# Altium schematic symbol library PCB_PTUMotorDriver.SCHLIB: 144 symbols (part 2 of 3)
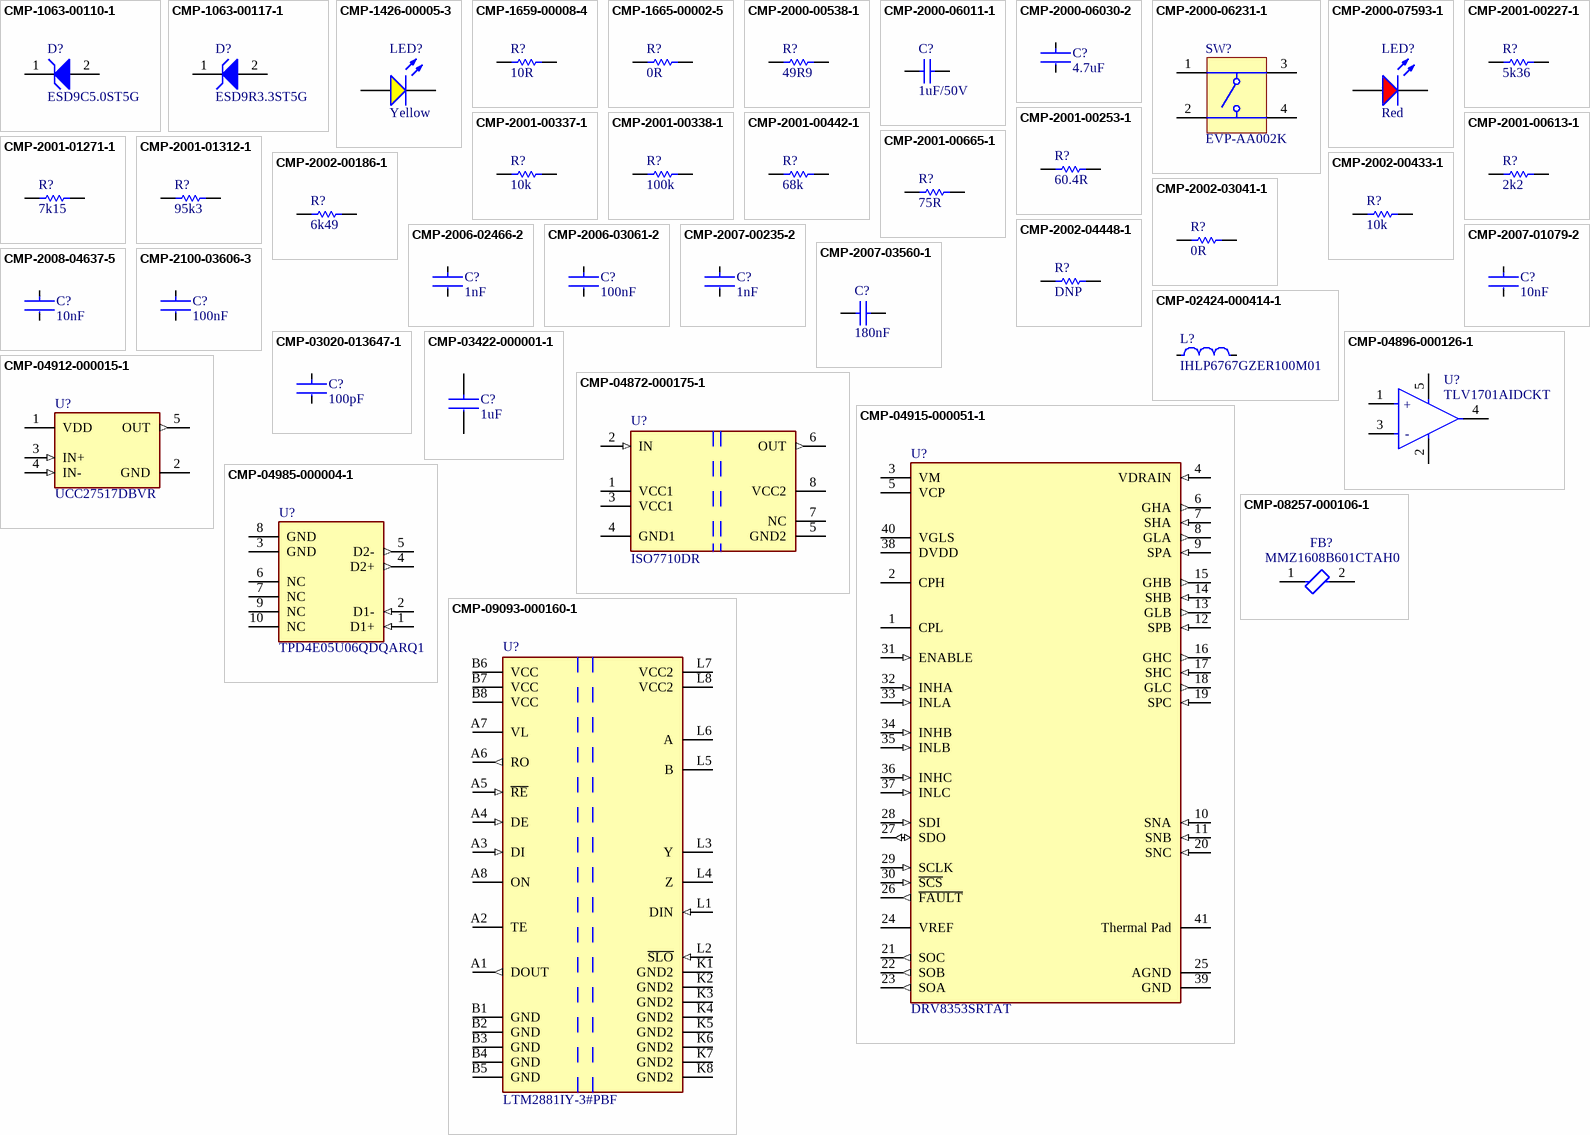
[diagram p4: symbols CMP-1063-00110-1 to CMP-09093-000160-1]

## CMP-2002-03041-1
designator R?, comment 0R
Resistor 0R 0402; Part Number: CRCW04020000Z0EDHP; Manufacturer: Vishay Dale; Value: 0Ohm; Voltage Rating: 50V; Power Rating: 200mW; Temperature Coefficient: 0ppm/°C; Max Power Dissipation: 125mW; Supplier 1: Digi-Key; Supplier Part Number 1: 541-0.0YBCT-ND; Manufacturer Part Number: CRCW04020000Z0EDHP; RoHS: Yes; Category: Chip SMD Resistors; Stock 1: 527407; Pricing 1: 1=0.13000, 10=0.11300, 25=0.07840, 50=0.06080, 100=0.04350, 250=0.03388, 500=0.02694, 1000=0.01912, 5000=0.01477 (USD); Mount: Surface Mount; Case/Package: 0402; Weight: 2.3E-05oz; Case Code (Metric): 1005; Case Code (Imperial): 0402; Contact Plating: Tin; Min Operating Temperature: -55°C; Max Operating Temperature: 155°C; Packaging: Tape and Reel; Composition: Thick Film; Termination: SMD/SMT; Voltage Rating (DC): 50V; Package Quantity: 1; Military Standard: Not; Number of Terminations: 2; Features: Automotive AEC-Q200; Length: 1mm; Height: 0.3mm; Width: 0.02inch; Depth: 0.5mm; Radiation Hardening: No; REACH SVHC: Unknown; Lead Free: Lead Free; ComponentLink1URL: https://datasheet.ciiva.com/16494/crcwhpe3-16494453.pdf?src-supplier=Future+Electronics; ComponentLink1Description: https://datasheet.ciiva.com/16494/crcwhpe3-16494453.pdf?src-supplier=Future+Electronics; ComponentLink2URL: https://datasheet.ciiva.com/2470/crcwhpe3-2470555.pdf?src-supplier=Digi-Key; ComponentLink2Description: https://datasheet.ciiva.com/2470/crcwhpe3-2470555.pdf?src-supplier=Digi-Key; ComponentLink3URL: https://datasheet.ciiva.com/5562/crcwhpe3-46056-5562315.pdf?src-supplier=Mouser; ComponentLink3Description: https://datasheet.ciiva.com/5562/crcwhpe3-46056-5562315.pdf?src-supplier=Mouser; ComponentLink4URL: https://datasheet.ciiva.com/9109/crcwhpe3-9109963.pdf?src-supplier=Avnet; ComponentLink4Description: https://datasheet.ciiva.com/9109/crcwhpe3-9109963.pdf?src-supplier=Avnet; ComponentLink5URL: https://datasheet.ciiva.com/2470/crcwhpe3-2470556.pdf?src-supplier=Digi-Key; ComponentLink5Description: https://datasheet.ciiva.com/2470/crcwhpe3-2470556.pdf?src-supplier=Digi-Key; ComponentLink6URL: https://datasheet.ciiva.com/28621/1912814-28621324.pdf?src-supplier=Element14; ComponentLink6Description: https://datasheet.ciiva.com/28621/1912814-28621324.pdf?src-supplier=Element14; ComponentLink7URL: https://datasheet.ciiva.com/2470/crcwhpe3-2470557.pdf?src-supplier=Digi-Key; ComponentLink7Description: https://datasheet.ciiva.com/2470/crcwhpe3-2470557.pdf?src-supplier=Digi-Key; ComponentLink8URL: https://datasheet.ciiva.com/7725/crcwhpe3-7725758.pdf?src-supplier=Element14; ComponentLink8Description: https://datasheet.ciiva.com/7725/crcwhpe3-7725758.pdf?src-supplier=Element14
footprint RESC1005X40X25ML05T10 (Chip Resistor, 2-Leads, Body 1.00x0.50mm, IPC Low Density)
footprint RESC1005X40X25LL05T10 (Chip Resistor, 2-Leads, Body 1.00x0.50mm, IPC High Density)
footprint RESC1005X40X25NL05T10 (Chip Resistor, 2-Leads, Body 1.00x0.50mm, IPC Medium Density)
pins: 1, 2
1 alternate drawing of the same symbol

## CMP-2002-04448-1
designator R?, comment DNP
Resistor 49R9 0402; Manufacturer Part Number: RK73H1ETTP49R9F; Manufacturer: KOA Speer; Supplier 1: Mouser; Supplier Part Number 1: 660-RK73H1ETTP49R9F
footprint RESC1005X40X25NL10T10 (Chip Resistor, 2-Leads, Body 1.00x0.50mm, IPC Medium Density)
footprint RESC1005X40X25ML10T10 (Chip Resistor, 2-Leads, Body 1.00x0.50mm, IPC Low Density)
footprint RESC1005X40X25LL10T10 (Chip Resistor, 2-Leads, Body 1.00x0.50mm, IPC High Density)
pins: 1, 2
1 alternate drawing of the same symbol

## CMP-2006-02466-2
designator C?, comment 1nF
Capacitor 1nF 0603; Voltage Rating: 100V; Tolerance: 5%; Dielectric: C0G; Temperature Coefficient: 30ppm/°C; Material: Ceramic; Depth: 0.8mm; Thickness: 0.035inch; Termination: SMD/SMT; Radiation Hardening: No; Case Code (Imperial): 0603; Length: 1.6mm; Min Operating Temperature: -55°C; REACH SVHC: No SVHC; Packaging: Tape and Reel; Capacitance: 1nF; Case Code (Metric): 1608; Voltage Rating (DC): 100V; Case/Package: 0603; Package Quantity: 1; Width: 0.031inch; Voltage: 100V; Height: 0.8mm; Max Operating Temperature: 125°C; Mount: Surface Mount; Lead Free: Lead Free; Manufacturer Part Number: ?
footprint FP-GRM188-0_1-e0_2_0_5-IPC_B
footprint FP-GRM188-0_1-e0_2_0_5-IPC_C
footprint FP-GRM188-0_1-e0_2_0_5-IPC_A
footprint FP-GRM188-0_1-e0_2_0_5-MFG
pins: 1, 2

## CMP-2006-03061-2
designator C?, comment 100nF
Capacitor 100nF 0603; Manufacturer: KEMET; Manufacturer Part Number: C0603C104K5RACTU; Tolerance: 0.1; Temperature Coefficient: 30ppm/°C; Material: Ceramic; Automotive Grade: Grade 1; Voltage Rating: 50 V; Value: 0.10 μF; Temperature Characteristic: X7R; Temperature: -55°C to +125°C; RoHS: TRUE; Temperature Range High: +125°C; Lead Free: Yes; Octopart: https://octopart.com/c0603c104k5ractu-kemet-139244; Digikey Description: CAP CER 0.1UF 50V X7R 0603; Category: Cap; Package: C0603C-CF; ComponentLink2Description: Datasheet; Temperature Range Low: -55°C; Device Class L1: Passive Components; Automotive: Yes; Device Class L3: Ceramic Capacitors; ComponentLink2URL: https://api.kemet.com/component-edge/download/datasheet/C0603C100J5GACAUTO.pdf; Capacitance: 0.10 μF; Device Class L2: Capacitors; Height: 0.87mm; Supplier 1: Mouser; Supplier Part Number 1: 80-C0603C104K5R7867
footprint FP-C0603C-CF-MFG
footprint FP-C0603C-CF-IPC_C
footprint FP-C0603C-CF-IPC_B
footprint FP-C0603C-CF-IPC_A
pins: 1, 2

## CMP-2007-00235-2
designator C?, comment 1nF
Capacitor 1nF 0805; Manufacturer: KEMET; Manufacturer Part Number: C0805C102J5GACTU; Value: 1,000 pF; Voltage Rating: 50 V; Temperature Characteristic: C0G; Material: Ceramic; Temperature Coefficient: 30ppm/°C; Tolerance: 0.05; Automotive: No; Device Class L1: Passive Components; Digikey Description: CAP CER 1000PF 50V C0G/NP0 0805; Lead Free: Yes; Capacitance: 1,000 pF; Package: C0805C-DN; RoHS: TRUE; Temperature Range High: +125°C; Height: 0.88mm; Ipc Land Pattern Name: CAPC200125X78; Category: Cap; ComponentLink2URL: https://content.kemet.com/datasheets/KEM_C1003_C0G_SMD.pdf; Device Class L2: Capacitors; ComponentLink2Description: Datasheet; Temperature: -55°C to +125°C; Octopart: https://octopart.com/c0805c102j5gactu-kemet-97757; Mouser Description: Multilayer Ceramic Capacitors MLCC - SMD/SMT 50volts 1000pF C0G 5%; Device Class L3: Ceramic Capacitors; Temperature Range Low: -55°C; Supplier 1: Mouser; Supplier Part Number 1: 80-C0805C102J5G
footprint FP-C0805C-DN-MFG
footprint FP-C0805C-DN-IPC_C
footprint FP-C0805C-DN-IPC_B
footprint FP-C0805C-DN-IPC_A
pins: 1, 2

## CMP-2007-01079-2
designator C?, comment 10nF
Capacitor 10nF 0805; Manufacturer Part Number: C0805C103K5RACTU; Manufacturer: KEMET; Capacitance: 10,000 pF; Material: Ceramic; Tolerance: 0.1; Voltage Rating: 50 V; Value: 10,000 pF; Temperature Coefficient: 30ppm/°C; Temperature Characteristic: X7R; Temperature: -55°C to +125°C; Device Class L3: Ceramic Capacitors; ComponentLink2URL: https://content.kemet.com/datasheets/KEM_C1003_C0G_SMD.pdf; Temperature Range Low: -55°C; Ipc Land Pattern Name: CAPC200125X78; Height: 0.88mm; Temperature Range High: +125°C; Category: Cap; ComponentLink2Description: Datasheet; Octopart: https://octopart.com/c0805c103k5ractu-kemet-90536; Package: C0805C-DN; Device Class L2: Capacitors; RoHS: TRUE; Automotive: No; Digikey Description: CAP CER 10000PF 50V X7R 0805; Device Class L1: Passive Components; Lead Free: Yes; Supplier 1: Farnell; Supplier Part Number 1: 1414662
footprint FP-C0805C-DN-MFG
footprint FP-C0805C-DN-IPC_C
footprint FP-C0805C-DN-IPC_B
footprint FP-C0805C-DN-IPC_A
pins: 1, 2

## CMP-2007-03560-1
designator C?, comment 180nF
Capacitor 180nF 0805; Manufacturer: Murata; Manufacturer Part Number: GRM21BR71C184KA01L; Supplier 1: Mouser; Supplier Part Number 1: 81-GRM40X184K16L
footprint CAPC2013X135X45ML10T25 (Chip Capacitor, 2-Leads, Body 2.00x1.25mm, IPC Low Density)
footprint CAPC2013X135X45LL10T25 (Chip Capacitor, 2-Leads, Body 2.00x1.25mm, IPC High Density)
footprint CAPC2013X135X45NL10T25 (Chip Capacitor, 2-Leads, Body 2.00x1.25mm, IPC Medium Density)
pins: 1, 2
1 alternate drawing of the same symbol

## CMP-2008-04637-5
designator C?, comment 10nF
Capacitor 10nF ?; Voltage Rating: 50V; Tolerance: 10%; Dielectric: X7R; Material: Ceramic; Voltage: 25V; Mount: Surface Mount; Max Operating Temperature: 125°C; Package Quantity: 1; Radiation Hardening: No; Length: 1mm; Voltage Rating (DC): 50V; Case Code (Metric): 1005; Packaging: Tape and Reel; Width: 0.02inch; Min Operating Temperature: -55°C; Height: 0.5mm; Case Code (Imperial): 0402; REACH SVHC: No SVHC; Lead Free: Lead Free; Case/Package: 0402; Termination: SMD/SMT; Thickness: 0.022inch; Number of Pins: 2; Capacitance: 10nF; Depth: 0.5mm
footprint FP-GRM155-0_05-IPC_C
footprint FP-GRM155-0_05-IPC_A
footprint FP-GRM155-0_05-IPC_B
footprint FP-GRM155-0_05-MFG
pins: 1, 2

## CMP-2100-03606-3
designator C?, comment 100nF
Capacitor 100nF 0805; Manufacturer Part Number: CC0805KRX7R9BB104; Manufacturer: Yageo; Tolerance: 0.1; Temperature Characteristic: X7R; Voltage Rating: 50 V; Material: Ceramic; Device Class L1: Passive Components; ComponentLink2Description: Datasheet; Package: CC0805-0.85; Digikey Description: CAP CER 0.1UF 50V X7R 0805; Capacitance: 100 nF; Device Class L3: Ceramic Capacitors; Value: 100 nF; Temperature: -30°C to +85°C; Height: 0.95mm; RoHS: TRUE; Ipc Land Pattern Name: CAPC200125X85; Device Class L2: Capacitors; Category: Cap; Temperature Range Low: -30°C; Temperature Range High: +85°C; Mouser Description: Multilayer Ceramic Capacitors MLCC - SMD/SMT 100nF 50V X7R 10%; Footprint Url: http://www.yageo.com/exep/pages/download/literatures/UPY-C_GEN_24.pdf; Automotive: No; Octopart: https://octopart.com/cc0805krx7r9bb104-yageo-192993; Lead Free: Yes; ComponentLink2URL: http://www.yageo.com/documents/recent/UPY-GPHC_Y5V_6.3V-to-50V_8.pdf; Supplier 1: Farnell; Supplier Part Number 1: 2346967
footprint FP-CC0805-0_85-MFG
footprint FP-CC0805-0_85-IPC_C
footprint FP-CC0805-0_85-IPC_B
footprint FP-CC0805-0_85-IPC_A
pins: 1, 2

## CMP-02424-000414-1
designator L?, comment IHLP6767GZER100M01
Commercial Inductors, High Saturation Series 10uH 16.5A 12mΩ 20%; Manufacturer Part Number: 70-IHLP6767GZER100M0; Saturation Current: 25A; Shielding: Shielded; Core Material: Metal; DC Resistance (DCR): 12mR; Test Frequency: 100kHz; Self Resonant Frequency: 2MHz; Min Operating Temperature: -55°C; RMS Current (Irms): 16.5A; Case/Package: 6767; Max DC Current: 25A; Depth: 17.15mm; Inductance: 10uH; Length: 17.15mm; Inductance Tolerance: 20%; Height - Seated (Max): 0.276inch; Military Standard: Not; Packaging: Tape and Reel; Package Quantity: 200; Lead Free: Lead Free; Height: 7mm; Max Operating Temperature: 125°C; Current Rating: 16.5A; Termination: SMD/SMT; Width: 0.675inch; Radiation Hardening: No; Mount: Surface Mount; Tolerance: 20%; Supplier 1: Mouser
footprint FP-IHLP-6767GZ-FP_3_825x1-MFG
pins: 1, 2

## CMP-03020-013647-1
designator C?, comment 100pF
Capacitor 100pF 0805 - unused; Manufacturer Part Number: C0805C101J5GACTU; Manufacturer: KEMET; Temperature Characteristic: C0G; Voltage Rating: 50 V; Tolerance: 0.05; Material: Ceramic; Temperature Coefficient: 30ppm/°C; Temperature Range High: +125°C; Device Class L1: Passive Components; Category: Cap; Capacitance: 100 pF; Temperature Range Low: -55°C; Height: 0.88mm; Package: C0805C-DN; Device Class L2: Capacitors; Octopart: https://octopart.com/c0805c101j5gactu-kemet-100795; Ipc Land Pattern Name: CAPC200125X78; Value: 100 pF; RoHS: TRUE; Temperature: -55°C to +125°C; Lead Free: Yes; Automotive: No; ComponentLink2URL: https://content.kemet.com/datasheets/KEM_C1003_C0G_SMD.pdf; ComponentLink2Description: Datasheet; Digikey Description: CAP CER 100PF 50V C0G/NP0 0805; Device Class L3: Ceramic Capacitors; Supplier 1: Digikey; Supplier Part Number 1: 399-C0805C101J5GACTUCT-ND
footprint FP-C0805C-DN-MFG
footprint FP-C0805C-DN-IPC_C
footprint FP-C0805C-DN-IPC_B
footprint FP-C0805C-DN-IPC_A
pins: 1, 2

## CMP-03422-000001-1
designator C?, comment 1uF
Capacitor 1uF 0805; Manufacturer: Yageo; Manufacturer Part Number: CC0805KKX7R7BB105; Voltage Rating: 16 V; Temperature Characteristic: X7R; Material: Ceramic; Tolerance: 0.1; Category: Cap; Capacitance: 1 uF; ComponentLink2Description: Datasheet; Automotive: No; Temperature Range High: +85°C; RoHS: TRUE; Footprint Url: http://www.yageo.com/exep/pages/download/literatures/UPY-C_GEN_24.pdf; Mouser Description: Multilayer Ceramic Capacitors MLCC - SMD/SMT 1.0uF 16V X7R 10%; Height: 0.95mm; Ipc Land Pattern Name: CAPC200125X85; Temperature: -30°C to +85°C; Lead Free: Yes; Value: 1 uF; Package: CC0805-0.85; Temperature Range Low: -30°C; Device Class L1: Passive Components; Device Class L3: Ceramic Capacitors; Octopart: https://octopart.com/cc0805kkx7r7bb105-yageo-8376555; ComponentLink2URL: http://www.yageo.com/documents/recent/UPY-GPHC_Y5V_6.3V-to-50V_8.pdf; Device Class L2: Capacitors; Digikey Description: CAP CER 1UF 16V X7R 0805; Supplier 1: Mouser; Supplier Part Number 1: 603-CC805KKX7R7BB105
footprint FP-CC0805-0_85-MFG
footprint FP-CC0805-0_85-IPC_C
footprint FP-CC0805-0_85-IPC_B
footprint FP-CC0805-0_85-IPC_A
pins: 1, 2

## CMP-04872-000175-1
designator U?, comment ISO7710DR
DGTL ISO 3000VRMS 1CH GP 8SOIC; Manufacturer: Texas Instruments; Number of Channels: 1; Data Rate: 100Mbps; Channel Type: Unidirectional; Propagation Delay: 16ns; Pulse Width Distortion (PWD): 4.9ns; Isolated Power: No; Interface: 1514Interface; Max Supply Voltage: 5.5V; Min Supply Voltage: 2.25V; Min Operating Temperature: -55°C; Type: General Purpose; Packaging: Tape and Reel; RoHS Compliant: Yes; Number of Pins: 8; Max Operating Temperature: 125°C; Case/Package: SOIC; Mount: Surface Mount; Supplier: Digikey; Supplier Part Number: 296-48557-1-ND; Manufacturer Part Number: ISO7710DR; RoHS: Yes; Category: Interface ICs; Stock: 1713; Pricing: 1=1.52, 10=1.111, 25=1.0088, 100=0.8959, 250=0.84212, 500=0.80966, 1000=0.78295 (USD); Length: 4.9mm; Width: 3.91mm; Height: 1.75mm; Thickness: 1.58mm; ComponentLink1URL: http://www.ti.com/general/docs/suppproductinfo.tsp?distId=10&amp;gotoUrl=http%3A%2F%2Fwww.ti.com%2Flit%2Fgpn%2Fiso7710&src-supplier=Digikey; ComponentLink1Description: http://www.ti.com/general/docs/suppproductinfo.tsp?distId=10&amp;gotoUrl=http%3A%2F%2Fwww.ti.com%2Flit%2Fgpn%2Fiso7710&src-supplier=Digikey
footprint FP-D0008B-IPC_A
footprint FP-D0008B-MFG
footprint FP-D0008B-IPC_C
footprint FP-D0008B-IPC_B
pins: 1 VCC1 (power), 2 IN (in), 3 VCC1 (power), 4 GND1 (power), 5 GND2 (power), 6 OUT (out), 7 NC, 8 VCC2 (power)

## CMP-04896-000126-1
designator U?, comment TLV1701AIDCKT
IC COMPARATOR SNGL 5SC70; Manufacturer Part Number: 595-TLV1701AIDCKT; Output Current: 20mA; Propagation Delay: 560ns; Max Input Current: 15nA; Quiescent Current: 75uA; Number of Channels: 1; Input Offset Voltage (Vos): 3.5mV; Min Operating Temperature: -40°C; Lead Free: Lead Free; Max Operating Temperature: 125°C; Mount: Surface Mount; Number of Pins: 5; RoHS Compliant: Yes; Type: General Purpose; Input Bias Current: 15nA; REACH SVHC: No SVHC; Response Time: 560ns; Case/Package: SC; Packaging: Tape and Reel; Number of Elements: 1; Supplier 1: Mouser
footprint FP-DCK0005A-IPC_A
footprint FP-DCK0005A-MFG
footprint FP-DCK0005A-IPC_C
footprint FP-DCK0005A-IPC_B
pins: 1 IN+ (hiz), 2 V- (power), 3 IN- (hiz), 4 OUT (oc), 5 V+ (power)
text: +; -

## CMP-04912-000015-1
designator U?, comment UCC27517DBVR
IC GATE DVR LOW SIDE 1CH SOT23-5; Manufacturer: Texas Instruments; Number Of Outputs: 1; Output Current: 4A; Standoff Height: 0mm; Fall Time: 7ns; Max Junction Temp: +140°C; Propagation Delay: 13ns; Min Supply Voltage: 4.5V; Max Supply Voltage: 18V; Rise Time: 8ns; ComponentLink2URL: https://www.ti.com/lit/ds/symlink/ucc27517.pdf; Mouser Description: 4A/4A Single Channel High-speed Low-side Gate Driver 5-SOT-23 -40 to 140; Digikey Description: IC GATE DVR LOW SIDE 1CH SOT23-5; Automotive: No; Category: IC; ComponentLink2Description: Datasheet; Package: DBV0005A; Octopart: https://octopart.com/ucc27517dbvr-texas+instruments-20613804; Number Of Drivers: 1; Device Class L2: Power Management ICs; Temperature Range High: +140°C; Temperature Range Low: -40°C; Device Class L3: Gate Drivers; Height: 1.45mm; Manufacturer Part Number: UCC27517DBVR; Device Class L1: Integrated Circuits (ICs); Lead Free: Yes; RoHS: TRUE; Temperature: -40°C to +140°C
footprint FP-DBV0005A-MFG
footprint FP-DBV0005A-IPC_C
footprint FP-DBV0005A-IPC_B
footprint FP-DBV0005A-IPC_A
pins: 1 VDD (power), 2 GND (power), 3 IN+ (in), 4 IN- (in), 5 OUT (out)

## CMP-04915-000051-1
designator U?, comment DRV8353SRTAT
IC MTR DRVR DC 6-95V 40WQFN; RoHS Compliant: Yes; Supplier 1: Mouser; Manufacturer Part Number: DRV8353SRTAT
footprint FP-RTA0040B-IPC_C
footprint FP-RTA0040B-IPC_A
footprint FP-RTA0040B-IPC_B
footprint FP-RTA0040B-MFG
pins: 1 CPL (power), 2 CPH (power), 3 VM (power), 4 VDRAIN (in), 5 VCP (power), 6 GHA (out), 7 SHA (in), 8 GLA (out), 9 SPA (in), 10 SNA (in), 11 SNB (in), 12 SPB (in), 13 GLB (out), 14 SHB (in), 15 GHB (out), 16 GHC (out), 17 SHC (in), 18 GLC (out), 19 SPC (in), 20 SNC (in), 21 SOC (out), 22 SOB (out), 23 SOA (out), 24 VREF, 25 AGND (power), 26 ~{FAULT} (out), 27 SDO (io), 28 SDI (in), 29 SCLK (in), 30 ~{SCS} (in), 31 ENABLE (in), 32 INHA (in), 33 INLA (in), 34 INHB (in), 35 INLB (in), 36 INHC (in), 37 INLC (in), 38 DVDD (power), 39 GND (power), 40 VGLS (power), 41 Thermal Pad (power)

## CMP-04985-000004-1
designator U?, comment TPD4E05U06QDQARQ1
TVS DIODE 5.5V 14V 10USON; Manufacturer: Texas Instruments; Direction: Unidirectional; Standoff Height: 0mm; Capacitance: 0.5pF; Number Of Channels: 4; Breakdown Voltage: 6.4V; Peak Pulse Power: 2.5W; Automotive Grade: Grade 1; Value: 0.5pF; Interface: USB,Ethernet,LVDS,Other; Peak Pulse Current: 2.5A; Operating Supply Voltage: 5.5V; Reverse Standoff Voltage: 5.5V; Package: DQA0010A; Temperature Range Low: -40°C; Temperature Range High: +125°C; Ambient Temperature Range Low: -40°C; Device Class L1: Circuit Protection; Clamping Voltage: 14V; Manufacturer Part Number: TPD4E05U06QDQARQ1; Device Class L2: ESD and Circuit Protection ICs; Octopart: https://octopart.com/tpd4e05u06qdqarq1-texas+instruments-48523459; Device Class L3: unset; Height: 0.55mm; Automotive: Yes; ComponentLink2Description: Datasheet; RoHS: TRUE; Ambient Temperature Range High: +125°C; Category: IC; Mouser Description: Automotive 4-Channel ESD Protection Solution for SuperSpeed (up to 5 Gbps) Interface 10-USON -40 to 125; Temperature: -40°C to +125°C; ComponentLink2URL: http://www.ti.com/lit/ds/symlink/tpd4e05u06-q1.pdf; Digikey Description: TVS DIODE 5.5V 14V 10USON; Lead Free: Yes
footprint FP-DQA0010A-MFG
pins: 1 D1+ (in), 2 D1- (in), 3 GND (power), 4 D2+ (out), 5 D2- (out), 6 NC, 7 NC, 8 GND (power), 9 NC, 10 NC

## CMP-08257-000106-1
designator FB?, comment MMZ1608B601CTAH0
Signal Line Ferrite Bead 600 Ω 100MHz 500mA DCR 400mΩ SMD 0603; Manufacturer: TDK; Tolerance: 25%; Impedance: 600R; DC Resistance (DCR): 400mR; Packaging: Cut Tape; Depth: 0.8mm; Case Code (Metric): 1608; Mount: Surface Mount; REACH SVHC: No SVHC; Case/Package: 0603; Max DC Current: 500mA; Height: 0.03inch; Case Code (Imperial): 0603; Package Quantity: 1; RoHS Compliant: Yes; Core Material: Ferrite; Length: 0.063inch; Current Rating: 500mA; Width: 0.031inch; Supplier: Digikey; Supplier Part Number: 445-MMZ1608B601CTAH0DKR-ND; Manufacturer Part Number: MMZ1608B601CTAH0; RoHS: Yes; Category: Ferrite Beads and Chips; Stock: 82523; Pricing: 1=0.1, 10=0.053, 25=0.046, 50=0.0414, 100=0.0372, 250=0.03208, 500=0.02858, 1000=0.02533 (USD); RMS Current (Irms): 500mA; ESR: 400mR; Test Frequency: 100MHz; ComponentLink1URL: https://datasheet.ciiva.com/46381/714910-46381640.pdf?src-supplier=Element14; ComponentLink1Description: https://datasheet.ciiva.com/46381/714910-46381640.pdf?src-supplier=Element14; ComponentLink2URL: https://datasheet.ciiva.com/46381/1795294-46381695.pdf?src-supplier=Element14; ComponentLink2Description: https://datasheet.ciiva.com/46381/1795294-46381695.pdf?src-supplier=Element14; ComponentLink3URL: https://datasheet.ciiva.com/46634/beads-commercial-signal-mmz-en-46634701.pdf?src-supplier=Digikey; ComponentLink3Description: https://datasheet.ciiva.com/46634/beads-commercial-signal-mmz-en-46634701.pdf?src-supplier=Digikey; ComponentLink4URL: https://datasheet.ciiva.com/46634/beads-commercial-signal-mmz-en-46634744.pdf?src-supplier=Digikey; ComponentLink4Description: https://datasheet.ciiva.com/46634/beads-commercial-signal-mmz-en-46634744.pdf?src-supplier=Digikey
footprint FP-MMZ1608-0_6-IPC_A
footprint FP-MMZ1608-0_6-MFG
footprint FP-MMZ1608-0_6-IPC_C
footprint FP-MMZ1608-0_6-IPC_B
pins: 1, 2

## CMP-09093-000160-1
designator U?, comment LTM2881IY-3#PBF
DGTL ISO 2.5KV RS422/RS485 32BGA; Manufacturer: Analog Devices / Linear Technology; Number of Transceivers: 1; Operating Supply Voltage: 3.3V; Supply Current: 25mA; Max Supply Voltage: 3.6V; Data Rate: 20Mbps; Interface: RS-422; Min Supply Voltage: 3V; Number of Channels: 1NUMBER; RoHS Compliant: Yes; Length: 15mm; Number of Transmitters: 1; Radiation Hardening: No; Case/Package: BGA; Series: µModule®; Mount: Surface Mount; Number of Receivers: 1; Width: 11.25mm; Height: 3.42mm; Number of Pins: 32; Package Quantity: 119; Number of Drivers: 1; Packaging: Tray; Max Operating Temperature: 85°C; REACH SVHC: No SVHC; Min Operating Temperature: -40°C; Nominal Supply Current: 25mA; Supplier: Digikey; Supplier Part Number: LTM2881IY-3#PBF-ND; Manufacturer Part Number: LTM2881IY-3#PBF; RoHS: Yes; Category: Interface ICs; Stock: 8537; Pricing: 1=22.88, 10=21.106, 25=20.1576, 119=18.02328, 238=17.19324, 476=16.36321 (USD); ComponentLink1URL: https://datasheet.ciiva.com/5688/1541719-zip-5688818.pdf?src-supplier=Farnell; ComponentLink1Description: https://datasheet.ciiva.com/5688/1541719-zip-5688818.pdf?src-supplier=Farnell; ComponentLink2URL: https://datasheet.ciiva.com/1700/28570-1700735.pdf?src-supplier=Digikey; ComponentLink2Description: https://datasheet.ciiva.com/1700/28570-1700735.pdf?src-supplier=Digikey; ComponentLink3URL: https://datasheet.ciiva.com/1559/1694679-1559769.pdf?src-supplier=Farnell; ComponentLink3Description: https://datasheet.ciiva.com/1559/1694679-1559769.pdf?src-supplier=Farnell; ComponentLink4URL: https://datasheet.ciiva.com/1503/1842976-1503057.pdf?src-supplier=Element14; ComponentLink4Description: https://datasheet.ciiva.com/1503/1842976-1503057.pdf?src-supplier=Element14
footprint FP-BGA-32-05-08-1851-MFG
footprint FP-BGA-32-05-08-1851-IPC_A
footprint FP-BGA-32-05-08-1851-IPC_B
footprint FP-BGA-32-05-08-1851-IPC_C
pins: A1 DOUT (out), A2 TE, A3 DI (in), A4 DE (in), A5 ~{RE} (in), A6 RO (out), A7 VL (power), A8 ON, B1 GND (power), B2 GND (power), B3 GND (power), B4 GND (power), B5 GND (power), B6 VCC (power), B7 VCC (power), B8 VCC (power), K1 GND2 (power), K2 GND2 (power), K3 GND2 (power), K4 GND2 (power), K5 GND2 (power), K6 GND2 (power), K7 GND2 (power), K8 GND2 (power), L1 DIN (in), L2 ~{SLO} (in), L3 Y (hiz), L4 Z (hiz), L5 B (hiz), L6 A (hiz), L7 VCC2 (power), L8 VCC2 (power)

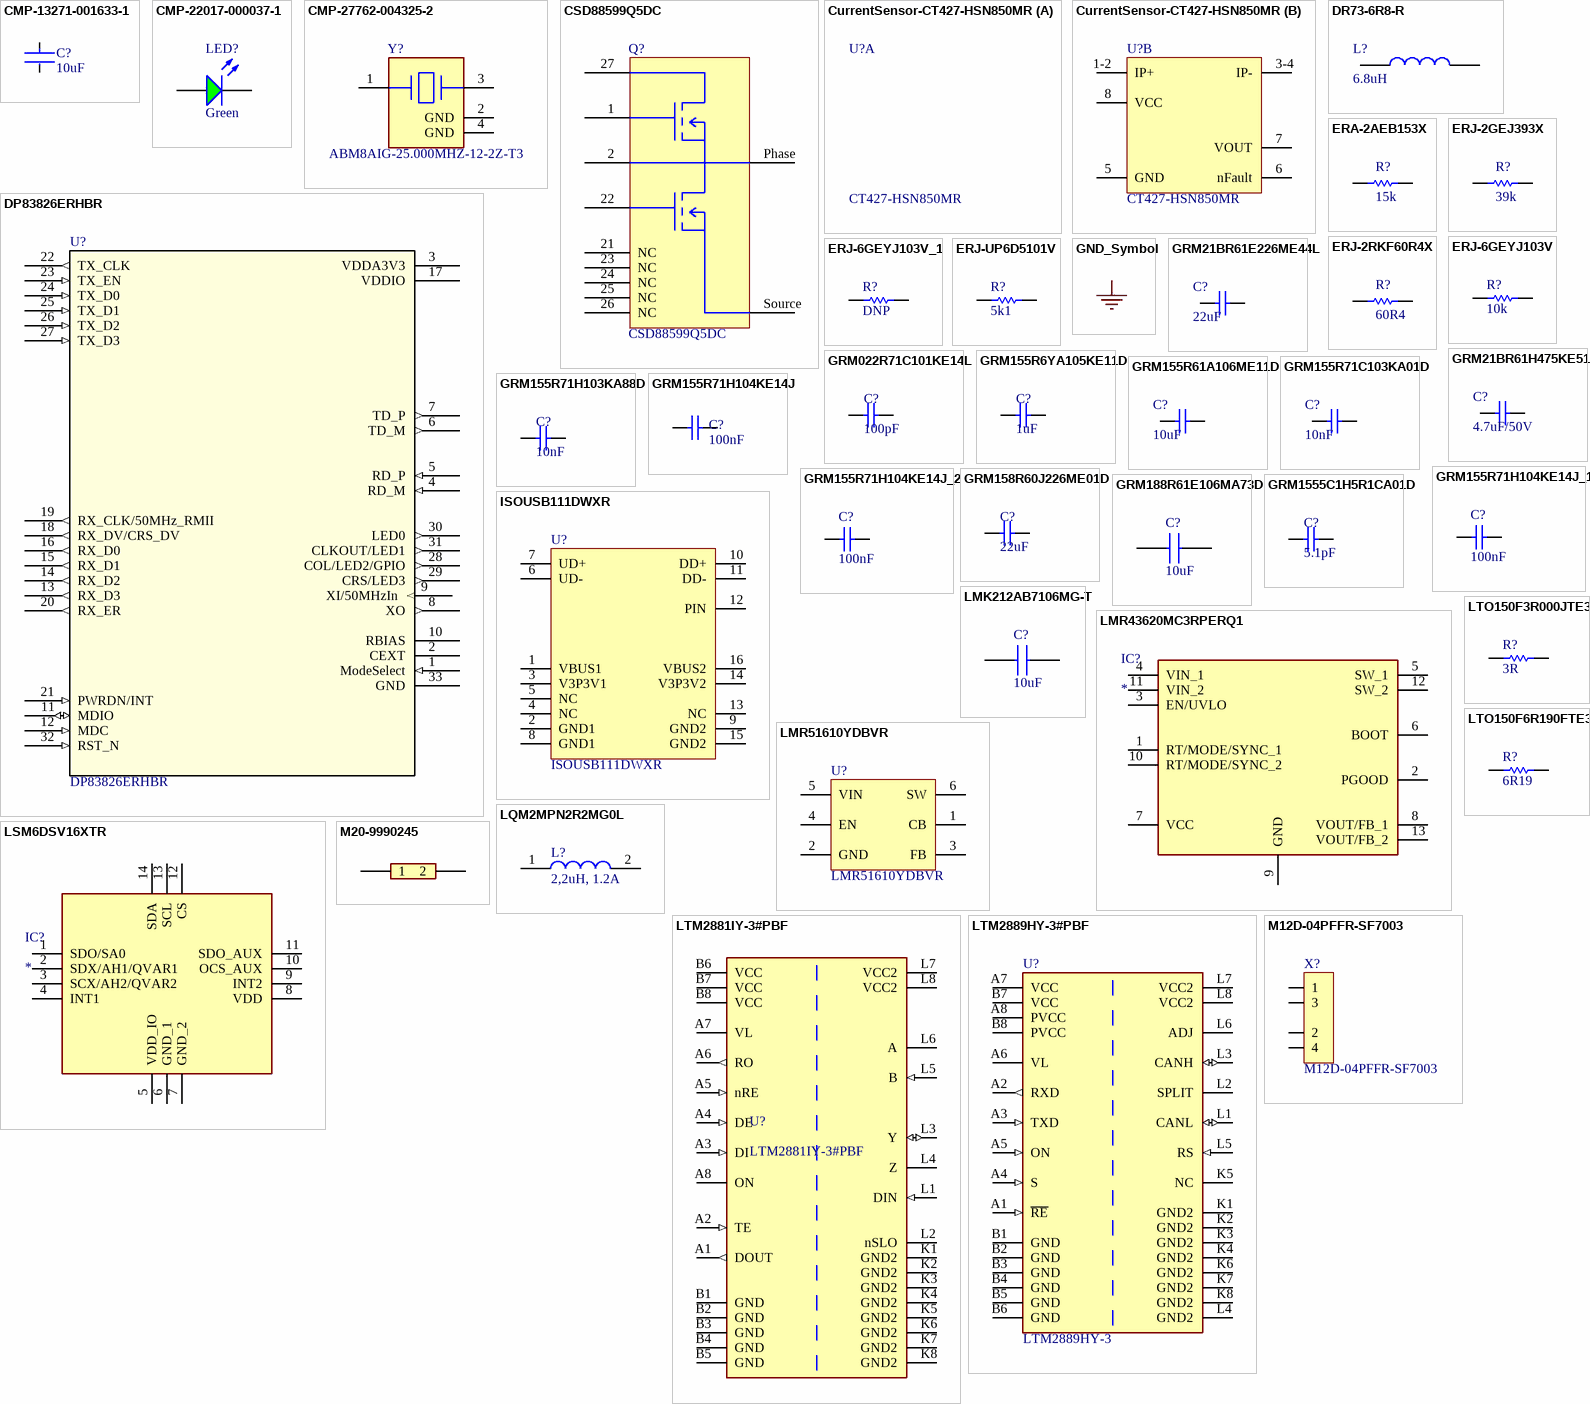
[diagram p2: symbols CMP-13271-001633-1 to M20-9990245]

## CMP-13271-001633-1
designator C?, comment 10uF
Cap Ceramic 10uF 16V X7R ±20% SMD 1206 +125°C Embossed T/R; Manufacturer Part Number: CL31B106MOHNNNE; Width: 0.063inch; Dielectric: X7R; Length: 0.126inch; Thickness: 0.071inch; Mount: Surface Mount; Packaging: Tape and Reel; Case Code (Imperial): 1206; Min Operating Temperature: -55°C; Tolerance: 20%; Case Code (Metric): 3216; Max Operating Temperature: 125°C; Voltage Rating: 16V; Capacitance: 10uF; Case/Package: 1206; Voltage Rating (DC): 16V
footprint FP-CL31-IPC_C
footprint FP-CL31-IPC_B
footprint FP-CL31-IPC_A
pins: 1, 2

## CMP-22017-000037-1
designator LED?, comment Green
LED GREEN CLEAR SMD; Manufacturer Part Number: 859-LTST-C171KGKT; Number of LEDs: 1; Viewing Angle: 130°; Lens Style: Rectangular; Dominant Wavelength: 571nm; Test Current: 20mA; Luminous Intensity: 35mcd; Power Rating: 75mW; Forward Voltage: 2.4V; Forward Current: 30mA; Reverse Voltage: 5V; Lens Color: Colorless; Wavelength: 574nm; Height: 0.8mm; Illumination Color: Green; Length: 2mm; Case/Package: 0805; Number of Pins: 2; Number of Elements: 1; Package Quantity: 1; Depth: 1.25mm; Lens Transparency: Clear; Width: 1.25mm; Color: Green; Radiation Hardening: No; Mount: Surface Mount; Packaging: Tape and Reel; Case Code (Metric): 2012; Lead Free: Lead Free; Max Operating Temperature: 85°C; Min Operating Temperature: -55°C; Case Code (Imperial): 0805; Power Dissipation: 75mW; Supplier 1: Mouser
footprint FP-LTST-C171KGKT-MFG
pins: 1 K, 2 A

## CMP-27762-004325-2
designator Y?, comment ABM8AIG-25.000MHZ-12-2Z-T3
Crystal 25MHz ±20ppm (Tol) ±50ppm (Stability) 12pF FUND 50Ω Automotive 4-Pin Ultra Mini-CSMD T/R; ESR (Equivalent Series Resistance): 50R; Load Capacitance: 12pF; Ratings: AEC-Q200; Frequency: 25MHz; Packaging: Cut Tape; Frequency Stability: 50ppm; Series: ABM8AIG; RoHS Compliant: Yes; Height: 0.031inch; Width: 0.098inch; Mount: Surface Mount; Length: 0.126inch; Frequency Tolerance: 20ppm; Min Operating Temperature: -40°C; Case/Package: SMD/SMT; Max Operating Temperature: 125°C; Manufacturer Part Number: ABM8AIG-25.000MHZ-12-2Z-T3
footprint FP-ABM8AIG-MFG
pins: 1, 2 GND (power), 3, 4 GND (power)

## CSD88599Q5DC
designator Q?
Integrated Circuit; Manufacturer_Name: Texas Instruments; Datasheet Link: http://www.ti.com/lit/ds/symlink/csd88599q5dc.pdf; Height: 1.05mm; Manufacturer Part Number: CSD88599Q5DC; Mouser Part Number: 595-CSD88599Q5DC; Mouser Price/Stock: https://www.mouser.co.uk/ProductDetail/Texas-Instruments/CSD88599Q5DC?qs=5aG0NVq1C4z5gVbcQ76feA%3D%3D; Arrow Part Number: CSD88599Q5DC; Arrow Price/Stock: null?region=nac; Supplier 1: Mouser; Supplier Part Number 1: 595-CSD88599Q5DC
footprint CSD88599Q5DC
pins: 1, 2, 21 NC, 22, 23 NC, 24 NC, 25 NC, 26 NC, 27, Phase, Source

## CurrentSensor-CT427-HSN850MR
designator U?, comment CT427-HSN850MR
Manufacturer Part Number: 462-CT427-HSN850MR; Supplier 1: Mouser
footprint SOIC8-CT427
part B pins: 1-2 IP+, 3-4 IP-, 5 GND, 6 nFault, 7 VOUT, 8 VCC

## DP83826ERHBR
designator U?
Ethernet Transceiver, 1-Trnsvr, PQCC32; Manufacturer: Texas Instruments; Supplier: Digikey; Supplier Part Number: 296-DP83826ERHBRCT-ND; Manufacturer Part Number: DP83826ERHBR; RoHS: Yes; Category: Ethernet Interface ICs; Stock: 2127; Pricing: 1=3.1, 10=2.321, 25=2.1264, 100=1.9128, 250=1.81096, 500=1.74958, 1000=1.69905 (USD); ComponentLink1URL: https://www.ti.com:443/lit/ds/symlink/dp83826e.pdf?src-supplier=IHS+Markit; ComponentLink1Description: https://www.ti.com:443/lit/ds/symlink/dp83826e.pdf?src-supplier=IHS+Markit; ComponentLink2URL: http://www.ti.com/general/docs/suppproductinfo.tsp?distId=10&amp;gotoUrl=http%3A%2F%2Fwww.ti.com%2Flit%2Fgpn%2Fdp83826e&src-supplier=Digikey; ComponentLink2Description: http://www.ti.com/general/docs/suppproductinfo.tsp?distId=10&amp;gotoUrl=http%3A%2F%2Fwww.ti.com%2Flit%2Fgpn%2Fdp83826e&src-supplier=Digikey; Supplier 1: Mouser; Supplier Part Number 1: 595-DP83826ERHBR; Supplier 2: Digikey; Supplier Part Number 2: 296-DP83826ERHBRCT-ND
footprint QFN_ERHBR_TEX
pins: 1 ModeSelect (in), 2 CEXT, 3 VDDA3V3 (power), 4 RD_M (in), 5 RD_P (in), 6 TD_M (out), 7 TD_P (out), 8 XO (out), 9 XI/50MHzIn (in), 10 RBIAS, 11 MDIO (io), 12 MDC (in), 13 RX_D3 (out), 14 RX_D2 (out), 15 RX_D1 (out), 16 RX_D0 (out), 17 VDDIO (power), 18 RX_DV/CRS_DV (out), 19 RX_CLK/50MHz_RMII (out), 20 RX_ER (out), 21 PWRDN/INT (in), 22 TX_CLK (out), 23 TX_EN (in), 24 TX_D0 (in), 25 TX_D1 (in), 26 TX_D2 (in), 27 TX_D3 (in), 28 COL/LED2/GPIO (out), 29 CRS/LED3 (out), 30 LED0 (out), 31 CLKOUT/LED1 (out), 32 RST_N (in), 33 GND (power)

## DR73-6R8-R
designator L?, comment 6.8uH
Inductor 6.8uH 2.55A 43.5 MOHM; Manufacturer_Name: Eaton; Manufacturer Part Number: DR73-6R8-R; Datasheet Link: https://www.eaton.com/content/dam/eaton/products/electronic-components/resources/data-sheet/eaton-dr-high-power-density-high-efficiency-shielded-drum-core-power-inductors-data-sheet.pdf; Height: 3.55mm; Mouser Part Number: 704-DR73-6R8-R; Mouser Price/Stock: https://www.mouser.co.uk/ProductDetail/Eaton-Electronics/DR73-6R8-R?qs=yzwxPInThYRgvP%252Bo5UKn2A%3D%3D; Arrow Part Number: DR73-6R8-R; Arrow Price/Stock: https://www.arrow.com/en/products/dr73-6r8-r/eaton?utm_currency=USD&region=nac
footprint DR736R8R
pins: 1, 2

## ERA-2AEB153X
designator R?, comment 15k
Resistor 15k 0402; Manufacturer_Name: Panasonic; Manufacturer Part Number: ERA-2AEB153X; Datasheet Link: http://industrial.panasonic.com/cdbs/www-data/pdf/RDM0000/AOA0000C307.pdf; Height: 0.4mm; Mouser Part Number: 667-ERA-2AEB153X; Mouser Price/Stock: https://www.mouser.co.uk/ProductDetail/Panasonic/ERA-2AEB153X?qs=YFwoyZoVY0idffT2yupmlA%3D%3D; Arrow Part Number: ERA-2AEB153X; Arrow Price/Stock: https://www.arrow.com/en/products/era2aeb153x/panasonic?utm_currency=USD&region=nac
footprint ERA2AED122X
pins: 1, 2

## ERJ-2GEJ393X
designator R?, comment 39k
Resistor 39k 0402; Manufacturer_Name: Panasonic; Manufacturer Part Number: ERJ-2GEJ393X; Datasheet Link: https://datasheet.datasheetarchive.com/originals/distributors/DKDS40/DSANUWW0010662.pdf; Height: 0.4mm; Mouser Part Number: 667-ERJ-2GEJ393X; Mouser Price/Stock: https://www.mouser.co.uk/ProductDetail/Panasonic/ERJ-2GEJ393X?qs=H7k1u0Mp9JQCuMRf%252BnUDFQ%3D%3D
footprint ERJ2RKD1004X
pins: 1, 2

## ERJ-2RKF60R4X
designator R?, comment 60R4
Resistor 60R4 1% 0402; Manufacturer_Name: Panasonic; Manufacturer Part Number: ERJ-2RKF60R4X; Datasheet Link: https://industrial.panasonic.com/cdbs/www-data/pdf/RDA0000/AOA0000C86.pdf; Height: 0.4mm; Mouser Part Number: 667-ERJ-2RKF60R4X; Mouser Price/Stock: https://www.mouser.com/Search/Refine.aspx?Keyword=667-ERJ-2RKF60R4X; Arrow Part Number: ERJ-2RKF60R4X; Arrow Price/Stock: https://www.arrow.com/en/products/erj-2rkf60r4x/panasonic?utm_currency=USD&region=europe; Supplier 1: DigiKey; Supplier Part Number 1: P60.4LCT-ND; Supplier 2: Mouser; Supplier Part Number 2: 667-ERJ-2RKF60R4X; Tollerance: 1%
footprint ERJ2RKD1004X
pins: 1, 2

## ERJ-6GEYJ103V
designator R?, comment 10k
Resistor 10k 0805; Manufacturer_Name: Panasonic; Manufacturer Part Number: ERJ-6GEYJ103V; Datasheet Link: https://datasheet.datasheetarchive.com/originals/distributors/DKDS40/DSANUWW0010911.pdf; Height: 0.7mm; Mouser Part Number: 667-ERJ-6GEYJ103V; Mouser Price/Stock: https://www.mouser.co.uk/ProductDetail/Panasonic/ERJ-6GEYJ103V?qs=tQNqqtTOejK5rw%252BRxJVxUA%3D%3D; Arrow Part Number: ERJ-6GEYJ103V; Arrow Price/Stock: https://www.arrow.com/en/products/erj6geyj103v/panasonic?region=nac; Supplier 1: Mouser; Supplier Part Number 1: 71-CRCW0603-10K-E3; Supplier 2: Digikey; Supplier Part Number 2: P10KADKR-ND
footprint RESC2012X70N
pins: 1, 2

## ERJ-6GEYJ103V_1
designator R?, comment DNP
Resistor 10k 0805; Manufacturer_Name: Panasonic; Manufacturer Part Number: ERJ-6GEYJ103V; Datasheet Link: https://datasheet.datasheetarchive.com/originals/distributors/DKDS40/DSANUWW0010911.pdf; Height: 0.7mm; Mouser Part Number: 667-ERJ-6GEYJ103V; Mouser Price/Stock: https://www.mouser.co.uk/ProductDetail/Panasonic/ERJ-6GEYJ103V?qs=tQNqqtTOejK5rw%252BRxJVxUA%3D%3D; Arrow Part Number: ERJ-6GEYJ103V; Arrow Price/Stock: https://www.arrow.com/en/products/erj6geyj103v/panasonic?region=nac; Supplier 1: Mouser; Supplier Part Number 1: 667-ERJ-6GEYJ103V
footprint RESC2012X70N
pins: 1, 2

## ERJ-UP6D5101V
designator R?, comment 5k1
Resistor 5k1 0805; Manufacturer_Name: Panasonic; Manufacturer Part Number: ERJ-UP6D5101V; Datasheet Link: https://industrial.panasonic.com/cdbs/www-data/pdf/RDP0000/AOA0000C337.pdf; Height: 0.7mm; Mouser Part Number: 667-ERJ-UP6D5101V; Mouser Price/Stock: https://www.mouser.co.uk/ProductDetail/Panasonic/ERJ-UP6D5101V?qs=ZcfC38r4Pouz7%2FLHthUDHQ%3D%3D; Arrow Part Number: ERJ-UP6D5101V; Arrow Price/Stock: https://www.arrow.com/en/products/erj-up6d5101v/panasonic?utm_currency=USD&region=nac; Supplier 1: Mouser; Supplier Part Number 1: 667-ERJ-UP6D5101V
footprint ERJUP6
pins: 1, 2

## GND_Symbol
designator *  (value not drawn)  (graphical)

## GRM21BR61E226ME44L
designator C?, comment 22uF
Capacitor 22uF 0805; Manufacturer_Name: Murata Electronics; Manufacturer Part Number: GRM21BR61E226ME44L; Datasheet Link: https://search.murata.co.jp/Ceramy/image/img/A01X/G101/ENG/GRM21BR61E226ME44-01A.pdf; Height: 1.45mm; Mouser Part Number: 81-GRM21BR61E226ME4L; Mouser Price/Stock: https://www.mouser.co.uk/ProductDetail/Murata-Electronics/GRM21BR61E226ME44L?qs=07yfQVYDK7vCPbMhLHi95g%3D%3D; Arrow Part Number: GRM21BR61E226ME44L; Arrow Price/Stock: https://www.arrow.com/en/products/grm21br61e226me44l/murata-manufacturing?utm_currency=USD&region=nac
footprint CAPC2012X145N
pins: 1, 2

## GRM21BR61H475KE51L
designator C?, comment 4.7uF/50V
Capacitor 4.7uF/50V 0805; Manufacturer_Name: Murata Electronics; Manufacturer Part Number: GRM21BR61H475KE51L; Datasheet Link: https://search.murata.co.jp/Ceramy/image/img/A01X/G101/ENG/GRM21BR61H475KE51-01A.pdf; Height: 1.45mm; Mouser Part Number: 81-GRM21BR61H475KE1L; Mouser Price/Stock: https://www.mouser.co.uk/ProductDetail/Murata-Electronics/GRM21BR61H475KE51L?qs=eeBpzGFlv%252B%252BOtLzDC1PY6Q%3D%3D; Arrow Part Number: GRM21BR61H475KE51L; Arrow Price/Stock: https://www.arrow.com/en/products/grm21br61h475ke51l/murata-manufacturing?region=nac
footprint CAPC2012X145N
pins: 1, 2

## GRM022R71C101KE14L
designator C?, comment 100pF
Capacitor 100pF/16V 0402; Manufacturer_Name: Murata Electronics; Manufacturer Part Number: GRM022R71C101KE14L; Datasheet Link: https://search.murata.co.jp/Ceramy/image/img/A01X/G101/ENG/GRM022R71C101KE14-01A.pdf; Height: 0.22mm; Mouser Part Number: 81-GRM022R71C101KE4L; Mouser Price/Stock: https://www.mouser.com/Search/Refine.aspx?Keyword=81-GRM022R71C101KE4L
footprint CAPC0402X22N
pins: 1, 2

## GRM155R6YA105KE11D
designator C?, comment 1uF
Capacitor 1uF/35V 0402 - storage; Manufacturer_Name: Murata Electronics; Manufacturer Part Number: GRM155R6YA105KE11D; Datasheet Link: https://search.murata.co.jp/Ceramy/image/img/A01X/G101/ENG/GRM155R6YA105KE11-01A.pdf; Height: 0.7mm; Mouser Part Number: 81-GRM155R6YA105KE1D; Mouser Price/Stock: https://www.mouser.co.uk/ProductDetail/Murata-Electronics/GRM155R6YA105KE11D?qs=hNud%2FORuBR1Z%2F4J6kBsCGQ%3D%3D; Arrow Part Number: GRM155R6YA105KE11D; Arrow Price/Stock: https://www.arrow.com/en/products/grm155r6ya105ke11d/murata-manufacturing?region=europe
footprint CAPC1005X70N
pins: 1, 2

## GRM155R61A106ME11D
designator C?, comment 10uF
Capacitor 10uF 0402 - storage; Manufacturer_Name: Murata Electronics; Manufacturer Part Number: GRM155R61A106ME11D; Datasheet Link: https://search.murata.co.jp/Ceramy/image/img/A01X/G101/ENG/GRM155R61A106ME11-01A.pdf; Height: 0.33mm; Mouser Part Number: 81-GRM155R61A106ME1D; Mouser Price/Stock: https://www.mouser.co.uk/ProductDetail/Murata-Electronics/GRM155R61A106ME11D?qs=xZ%2FP%252Ba9zWqZMJSi57Q8OyA%3D%3D; Arrow Part Number: GRM155R61A106ME11D; Arrow Price/Stock: https://www.arrow.com/en/products/grm155r61a106me11d/murata-manufacturing?utm_currency=USD&region=nac
footprint GRM15x
pins: 1, 2

## GRM155R71C103KA01D
designator C?, comment 10nF
Capacitor 10nF 0402; Manufacturer_Name: Murata Electronics; Manufacturer Part Number: GRM155R71C103KA01D; Datasheet Link: https://search.murata.co.jp/Ceramy/image/img/A01X/G101/ENG/GRM155R71C103KA01-01A.pdf; Height: 0.7mm; Mouser Part Number: 81-GRM36X103K16; Mouser Price/Stock: https://www.mouser.co.uk/ProductDetail/Murata-Electronics/GRM155R71C103KA01D?qs=8YPuuxuUzMI%252B9QLnzeLwhQ%3D%3D; Arrow Part Number: GRM155R71C103KA01D; Arrow Price/Stock: https://www.arrow.com/en/products/grm155r71c103ka01d/murata-manufacturing?utm_currency=USD&region=nac
footprint CAPC1005X70N
pins: 1, 2

## GRM155R71H103KA88D
designator C?, comment 10nF
Capacitor 10nF/50V 0402 - storage; Manufacturer_Name: Murata Electronics; Manufacturer Part Number: GRM155R71H103KA88D; Datasheet Link: https://search.murata.co.jp/Ceramy/image/img/A01X/G101/ENG/GRM155R71H103KA88-01A.pdf; Height: 0.33mm; Mouser Part Number: 81-GRM155R71H103KA8D; Mouser Price/Stock: https://www.mouser.co.uk/ProductDetail/Murata-Electronics/GRM155R71H103KA88D?qs=Dfh4SrgScWxOVlCuzd3ZyQ%3D%3D; Arrow Part Number: GRM155R71H103KA88D; Arrow Price/Stock: https://www.arrow.com/en/products/grm155r71h103ka88d/murata-manufacturing?utm_currency=USD&region=nac
footprint GRM15x
pins: 1, 2

## GRM155R71H104KE14J
designator C?, comment 100nF
Capacitor 100nF 0402 - storage; Manufacturer: Murata; Manufacturer Part Number: GRM155R71H104KE14J; Tolerance: 10%; Dielectric: X7R; Voltage Rating (DC): 50V; Supplier 1: Digi-Key; RoHS: Yes; Category: Ceramic Capacitors; Stock 1: 1916144; Pricing 1: 1=0.10000, 10=0.03800, 100=0.01680, 500=0.01198, 1000=0.00941, 2500=0.00855, 5000=0.00787 (USD); Mount: Surface Mount; Case/Package: 0402; Weight: 0.000212oz; Case Code (Imperial): 0402; Case Code (Metric): 1005; Min Operating Temperature: -55°C; Max Operating Temperature: 125°C; Termination: SMD/SMT; Composition: Ceramic; Package Quantity: 50000; Packaging: Tape and Reel; Value: 100nF; Voltage Rating: 50V; Length: 0.039inch; Height: 0.5mm; Width: 0.5mm; Thickness: 0.022inch; Lead Free: Lead Free; ComponentLink1URL: http://search.murata.co.jp/Ceramy/image/img/A01X/G101/ENG/GRM155R71H104KE14-01.pdf?src-supplier=Mouser; ComponentLink1Description: http://search.murata.co.jp/Ceramy/image/img/A01X/G101/ENG/GRM155R71H104KE14-01.pdf?src-supplier=Mouser; ComponentLink2URL: http://search.murata.co.jp/Ceramy/image/img/A01X/G101/ENG/GRM155R71H104KE14-01.pdf?src-supplier=Digi-Key; ComponentLink2Description: http://search.murata.co.jp/Ceramy/image/img/A01X/G101/ENG/GRM155R71H104KE14-01.pdf?src-supplier=Digi-Key; ComponentLink3URL: http://search.murata.co.jp/Ceramy/image/img/A01X/G101/ENG/GRM155R71H104KE14-01.pdf?src-supplier=Avnet; ComponentLink3Description: http://search.murata.co.jp/Ceramy/image/img/A01X/G101/ENG/GRM155R71H104KE14-01.pdf?src-supplier=Avnet; ComponentLink4URL: http://search.murata.co.jp/Ceramy/image/img/A01X/G101/ENG/GRM155R71H104KE14-01.pdf?src-supplier=Avnet+Europe; ComponentLink4Description: http://search.murata.co.jp/Ceramy/image/img/A01X/G101/ENG/GRM155R71H104KE14-01.pdf?src-supplier=Avnet+Europe; Supplier Part Number 1: 490-13342-1-ND
footprint CAPC1005X55X25LL05T10 (Chip Capacitor, 2-Leads, Body 1.00x0.50mm, IPC High Density)
footprint CAPC1005X55X25ML05T10 (Chip Capacitor, 2-Leads, Body 1.00x0.50mm, IPC Low Density)
footprint CAPC1005X55X25NL05T10 (Chip Capacitor, 2-Leads, Body 1.00x0.50mm, IPC Medium Density)
pins: 1, 2

## GRM155R71H104KE14J_1
designator C?, comment 100nF
Capacitor 0.1uF 0402; Manufacturer: Murata; Manufacturer Part Number: GRM155R71H104KE14J; Tolerance: 10%; Dielectric: X7R; Voltage Rating (DC): 50V; Supplier 1: Digi-Key; RoHS: Yes; Category: Ceramic Capacitors; Stock 1: 1916144; Pricing 1: 1=0.10000, 10=0.03800, 100=0.01680, 500=0.01198, 1000=0.00941, 2500=0.00855, 5000=0.00787 (USD); Mount: Surface Mount; Case/Package: 0402; Weight: 0.000212oz; Case Code (Imperial): 0402; Case Code (Metric): 1005; Min Operating Temperature: -55°C; Max Operating Temperature: 125°C; Termination: SMD/SMT; Composition: Ceramic; Package Quantity: 50000; Packaging: Tape and Reel; Value: 100nF; Voltage Rating: 50V; Length: 0.039inch; Height: 0.5mm; Width: 0.5mm; Thickness: 0.022inch; Lead Free: Lead Free; ComponentLink1URL: http://search.murata.co.jp/Ceramy/image/img/A01X/G101/ENG/GRM155R71H104KE14-01.pdf?src-supplier=Mouser; ComponentLink1Description: http://search.murata.co.jp/Ceramy/image/img/A01X/G101/ENG/GRM155R71H104KE14-01.pdf?src-supplier=Mouser; ComponentLink2URL: http://search.murata.co.jp/Ceramy/image/img/A01X/G101/ENG/GRM155R71H104KE14-01.pdf?src-supplier=Digi-Key; ComponentLink2Description: http://search.murata.co.jp/Ceramy/image/img/A01X/G101/ENG/GRM155R71H104KE14-01.pdf?src-supplier=Digi-Key; ComponentLink3URL: http://search.murata.co.jp/Ceramy/image/img/A01X/G101/ENG/GRM155R71H104KE14-01.pdf?src-supplier=Avnet; ComponentLink3Description: http://search.murata.co.jp/Ceramy/image/img/A01X/G101/ENG/GRM155R71H104KE14-01.pdf?src-supplier=Avnet; ComponentLink4URL: http://search.murata.co.jp/Ceramy/image/img/A01X/G101/ENG/GRM155R71H104KE14-01.pdf?src-supplier=Avnet+Europe; ComponentLink4Description: http://search.murata.co.jp/Ceramy/image/img/A01X/G101/ENG/GRM155R71H104KE14-01.pdf?src-supplier=Avnet+Europe; Supplier Part Number 1: 490-13342-1-ND
footprint CAPC1005X55X25LL05T10 (Chip Capacitor, 2-Leads, Body 1.00x0.50mm, IPC High Density)
footprint CAPC1005X55X25ML05T10 (Chip Capacitor, 2-Leads, Body 1.00x0.50mm, IPC Low Density)
footprint CAPC1005X55X25NL05T10 (Chip Capacitor, 2-Leads, Body 1.00x0.50mm, IPC Medium Density)
pins: 1, 2

## GRM155R71H104KE14J_2
designator C?, comment 100nF
Capacitor 0.1uF 0402; Manufacturer: Murata; Manufacturer Part Number: GRM155R71H104KE14J; Tolerance: 10%; Dielectric: X7R; Voltage Rating (DC): 50V; Supplier 1: Digi-Key; RoHS: Yes; Category: Ceramic Capacitors; Stock 1: 1916144; Pricing 1: 1=0.10000, 10=0.03800, 100=0.01680, 500=0.01198, 1000=0.00941, 2500=0.00855, 5000=0.00787 (USD); Mount: Surface Mount; Case/Package: 0402; Weight: 0.000212oz; Case Code (Imperial): 0402; Case Code (Metric): 1005; Min Operating Temperature: -55°C; Max Operating Temperature: 125°C; Termination: SMD/SMT; Composition: Ceramic; Package Quantity: 50000; Packaging: Tape and Reel; Value: 100nF; Voltage Rating: 50V; Length: 0.039inch; Height: 0.5mm; Width: 0.5mm; Thickness: 0.022inch; Lead Free: Lead Free; ComponentLink1URL: http://search.murata.co.jp/Ceramy/image/img/A01X/G101/ENG/GRM155R71H104KE14-01.pdf?src-supplier=Mouser; ComponentLink1Description: http://search.murata.co.jp/Ceramy/image/img/A01X/G101/ENG/GRM155R71H104KE14-01.pdf?src-supplier=Mouser; ComponentLink2URL: http://search.murata.co.jp/Ceramy/image/img/A01X/G101/ENG/GRM155R71H104KE14-01.pdf?src-supplier=Digi-Key; ComponentLink2Description: http://search.murata.co.jp/Ceramy/image/img/A01X/G101/ENG/GRM155R71H104KE14-01.pdf?src-supplier=Digi-Key; ComponentLink3URL: http://search.murata.co.jp/Ceramy/image/img/A01X/G101/ENG/GRM155R71H104KE14-01.pdf?src-supplier=Avnet; ComponentLink3Description: http://search.murata.co.jp/Ceramy/image/img/A01X/G101/ENG/GRM155R71H104KE14-01.pdf?src-supplier=Avnet; ComponentLink4URL: http://search.murata.co.jp/Ceramy/image/img/A01X/G101/ENG/GRM155R71H104KE14-01.pdf?src-supplier=Avnet+Europe; ComponentLink4Description: http://search.murata.co.jp/Ceramy/image/img/A01X/G101/ENG/GRM155R71H104KE14-01.pdf?src-supplier=Avnet+Europe; Supplier Part Number 1: 490-13342-1-ND
footprint CAPC1005X55X25LL05T10 (Chip Capacitor, 2-Leads, Body 1.00x0.50mm, IPC High Density)
footprint CAPC1005X55X25ML05T10 (Chip Capacitor, 2-Leads, Body 1.00x0.50mm, IPC Low Density)
footprint CAPC1005X55X25NL05T10 (Chip Capacitor, 2-Leads, Body 1.00x0.50mm, IPC Medium Density)
pins: 1, 2

## GRM158R60J226ME01D
designator C?, comment 22uF
Capacitor 22uF/6.3V 0402 - storage; Manufacturer_Name: Murata Electronics; Manufacturer Part Number: GRM158R60J226ME01D; Datasheet Link: https://search.murata.co.jp/Ceramy/image/img/A01X/G101/ENG/GRM158R60J226ME01-01A.pdf; Height: 0.8mm; Mouser Part Number: 81-GRM158R60J226ME1D; Mouser Price/Stock: https://www.mouser.co.uk/ProductDetail/Murata-Electronics/GRM158R60J226ME01D?qs=hd1VzrDQEGhRlVgN8RQ1oA%3D%3D; Arrow Part Number: GRM158R60J226ME01D; Arrow Price/Stock: https://www.arrow.com/en/products/grm158r60j226me01d/murata-manufacturing?region=nac
footprint GRT15x
pins: 1, 2

## GRM188R61E106MA73D
designator C?, comment 10uF
Capacitor 10uF 0603; Manufacturer_Name: Murata Electronics; Manufacturer Part Number: GRM188R61E106MA73D; Datasheet Link: https://search.murata.co.jp/Ceramy/image/img/A01X/G101/ENG/GRM188R61E106MA73-01A.pdf; Height: 0.9mm; Mouser Part Number: 81-GRM188R61E106MA3D; Mouser Price/Stock: https://www.mouser.co.uk/ProductDetail/Murata-Electronics/GRM188R61E106MA73D?qs=PoXZt%252B2CjACpktoD15Kv0Q%3D%3D; Arrow Part Number: GRM188R61E106MA73D; Arrow Price/Stock: https://www.arrow.com/en/products/grm188r61e106ma73d/murata-manufacturing?utm_currency=USD&region=nac; Supplier 1: Mouser; Supplier Part Number 1: 81-GRM188R61E106MA3D
footprint CAPC1608X90N
pins: 1, 2

## GRM1555C1H5R1CA01D
designator C?, comment 5.1pF
Capacitor 5.1pF/50V 0402; Manufacturer_Name: Murata Electronics; Manufacturer Part Number: GRM1555C1H5R1CA01D; Datasheet Link: https://search.murata.co.jp/Ceramy/image/img/A01X/G101/ENG/GRM1555C1H5R1CA01-01A.pdf; Height: 0.7mm; Mouser Part Number: 81-GRM1555C1H5R1CA1D; Mouser Price/Stock: https://www.mouser.com/Search/Refine.aspx?Keyword=81-GRM1555C1H5R1CA1D; Arrow Part Number: GRM1555C1H5R1CA01D; Arrow Price/Stock: https://www.arrow.com/en/products/grm1555c1h5r1ca01d/murata-manufacturing?region=nac
footprint CAPC1005X70N
pins: 1, 2

## ISOUSB111DWXR
designator U?
Low emissions, full and low speed isolated USB repeater 16-SSOP -40 to 125; Manufacturer: Texas Instruments; Supplier: Digikey; Supplier Part Number: 296-ISOUSB111DWXRCT-ND; Manufacturer Part Number: ISOUSB111DWXR; RoHS: No; Stock: 317; Pricing: 1=10.29, 10=9.294, 25=8.8616, 100=7.6946, 250=7.34876, 500=6.70034 (USD); Supplier 1: Digikey; Supplier Part Number 1: 296-ISOUSB111DWXRCT-ND
footprint DWX0016A (SOP, 16-Leads, Body 5.6x6.5mm, Pitch 0.65mm, IPC Low Density)
pins: 1 VBUS1, 2 GND1, 3 V3P3V1, 4 NC, 5 NC, 6 UD-, 7 UD+, 8 GND1, 9 GND2, 10 DD+, 11 DD-, 12 PIN, 13 NC, 14 V3P3V2, 15 GND2, 16 VBUS2

## LMK212AB7106MG-T
designator C?, comment 10uF
Capacitor 10uF 0805; Manufacturer_Name: TAIYO YUDEN; Manufacturer Part Number: LMK212AB7106MG-T; Datasheet Link: https://datasheet.datasheetarchive.com/originals/distributors/Datasheets-DGA20/25674.pdf; Height: 1.4mm; Mouser Part Number: 963-LMK212AB7106MG-T; Mouser Price/Stock: https://www.mouser.co.uk/ProductDetail/Taiyo-Yuden/LMK212AB7106MG-T?qs=CNQs48zzdnrud19jlu61Cg%3D%3D; Supplier 1: Digikey; Supplier Part Number 1: 587-3417-1-ND
footprint CAPC2013X140N
pins: 1, 2

## LMR43620MC3RPERQ1
designator IC?
Integrated Circuit; Manufacturer_Name: Texas Instruments; Manufacturer Part Number: LMR43620MC3RPERQ1; Datasheet Link: https://www.ti.com/lit/ds/symlink/lmr43610-q1.pdf; Height: 1mm
footprint LMR36506MSC5RPERQ1
pins: 1 RT/MODE/SYNC_1, 2 PGOOD, 3 EN/UVLO, 4 VIN_1, 5 SW_1, 6 BOOT, 7 VCC, 8 VOUT/FB_1, 9 GND, 10 RT/MODE/SYNC_2, 11 VIN_2, 12 SW_2, 13 VOUT/FB_2

## LMR51610YDBVR
designator U?
Integrated Circuit; Manufacturer: Texas Instruments; Manufacturer Part Number: LMR51610YDBVR; RoHS: No; Case/Package: SOT-23; Pins: 6; Length: 2.9mm; Width: 1.6mm; Thickness: 1.2mm; Supplier 1: Mouser; Supplier Part Number 1: 595-LMR51610YDBVR; Supplier 2: Digikey; Supplier Part Number 2: 296-LMR51610YDBVRCT-ND; Supplier 3: Digikey; Supplier Part Number 3: 296-LMR51610YDBVRDKR-ND
footprint FP-DBV0006A-MFG
footprint FP-DBV0006A-IPC_C
footprint FP-DBV0006A-IPC_B
footprint FP-DBV0006A-IPC_A
pins: 1 CB, 2 GND, 3 FB, 4 EN, 5 VIN, 6 SW

## LQM2MPN2R2MG0L
designator L?, comment 2,2uH, 1.2A
Inductor; Manufacturer_Name: Murata Electronics; Manufacturer Part Number: LQM2MPN2R2MG0L; Datasheet Link: https://search.murata.co.jp/Ceramy/image/img/P02/JELF243B-0022.pdf; Height: 1mm; Mouser Part Number: 81-LQM2MPN2R2MG0L; Mouser Price/Stock: https://www.mouser.co.uk/ProductDetail/Murata-Electronics/LQM2MPN2R2MG0L?qs=YinlzBdtFMj9%2Fj5t8GanUg%3D%3D; Arrow Part Number: LQM2MPN2R2MG0L; Arrow Price/Stock: https://www.arrow.com/en/products/lqm2mpn2r2mg0l/murata-manufacturing?utm_currency=USD&region=nac; Supplier 1: Mouser; Supplier Part Number 1: 81-LQM2MPN2R2MG0L
footprint LQM2MPN1R0NG0L (Footprint not found)
pins: 1, 2

## LSM6DSV16XTR
designator IC?
Integrated Circuit; Manufacturer_Name: STMicroelectronics; Manufacturer Part Number: LSM6DSV16XTR; Datasheet Link: https://www.st.com/resource/en/datasheet/lsm6dsv16x.pdf; Mouser Part Number: 511-LSM6DSV16XTR; Mouser Price/Stock: https://www.mouser.co.uk/ProductDetail/STMicroelectronics/LSM6DSV16XTR?qs=MyNHzdoqoQLCWe%2FE3pkKcA%3D%3D; Arrow Part Number: LSM6DSV16XTR; Arrow Price/Stock: https://www.arrow.com/en/products/lsm6dsv16xtr/stmicroelectronics?utm_currency=USD&region=nac
footprint LSM6DSV16BXTR
pins: 1 SDO/SA0, 2 SDX/AH1/QVAR1, 3 SCX/AH2/QVAR2, 4 INT1, 5 VDD_IO, 6 GND_1, 7 GND_2, 8 VDD, 9 INT2, 10 OCS_AUX, 11 SDO_AUX, 12 CS, 13 SCL, 14 SDA

## LTM2881IY-3#PBF
designator U?
RS485 transceiver; Manufacturer: Analog Devices; Supplier 1: Mouser; Supplier Part Number 1: 584-LTM2881IY-3#PBF; Supplier 2: Verical; Supplier Part Number 2: LTM2881IY-3#PBF; Manufacturer Part Number: LTM2881IY-3#PBF
footprint FP-BGA-32-05-08-1851-MFG
pins: A1 DOUT (out), A2 TE (in), A3 DI (in), A4 DE (in), A5 nRE (in), A6 RO (out), A7 VL (power), A8 ON (power), B1 GND (power), B2 GND (power), B3 GND (power), B4 GND (power), B5 GND (power), B6 VCC (power), B7 VCC (power), B8 VCC (power), K1 GND2 (power), K2 GND2 (power), K3 GND2 (power), K4 GND2 (power), K5 GND2, K6 GND2 (power), K7 GND2 (power), K8 GND2 (power), L1 DIN (in), L2 nSLO, L3 Y (io), L4 Z (power), L5 B (in), L6 A, L7 VCC2 (power), L8 VCC2 (power)

## LTM2889HY-3#PBF
designator U?, comment LTM2889HY-3
Manufacturer Part Number: LTM2889HY-3#PBF; Supplier 1: Arrow Electronics
footprint FP-BGA-32-05-08-1851-IPC_B
pins: A1 ~{RE} (in), A2 RXD (out), A3 TXD (in), A4 S (in), A5 ON (in), A6 VL (power), A7 VCC (power), A8 PVCC (power), B1 GND (power), B2 GND (power), B3 GND (power), B4 GND (power), B5 GND (power), B6 GND (power), B7 VCC (power), B8 PVCC (power), K1 GND2 (power), K2 GND2 (power), K3 GND2 (power), K4 GND2 (power), K5 NC, K6 GND2 (power), K7 GND2 (power), K8 GND2 (power), L1 CANL (io), L2 SPLIT, L3 CANH (io), L4 GND2 (power), L5 RS (in), L6 ADJ, L7 VCC2 (power), L8 VCC2 (power)